# Altium footprint library Package_DFN_QFN.PcbLib: 735 footprints (part 38 of 46)
Each footprint in its own frame and in the unit in brackets; x right, y up, seen from the top. Pads: shape width x height; smd on the part's side, far side on the other; paste and mask are expansions set on the pad; w line width, h text height; cw(c..) or ccw(c..) is an arc to the next point about the centre after c.
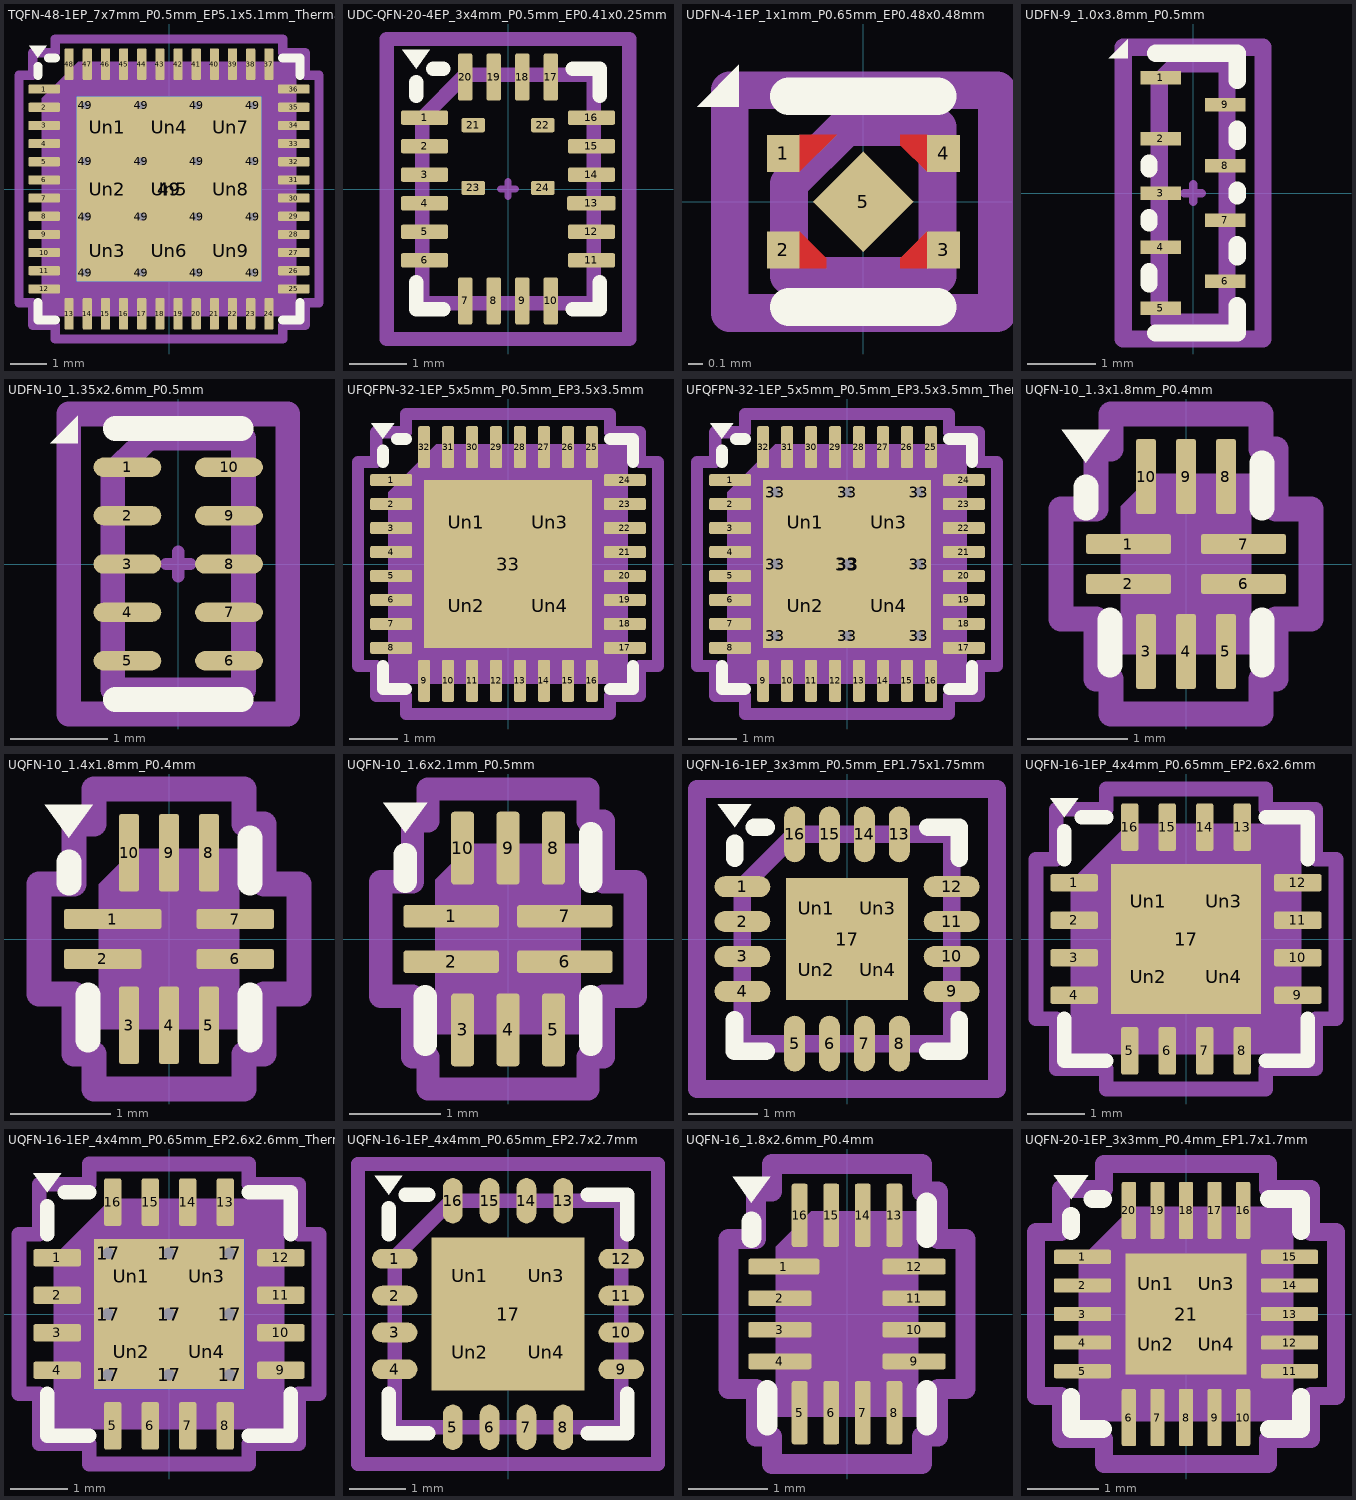
[diagram p37: the footprints below, top view; thin cyan lines are the x and y axes]

## TQFN-48-1EP_7x7mm_P0.5mm_EP5.1x5.1mm_ThermalVias [mm] "TQFN-48-1EP_7x7mm_P0.5mm_EP5.1x5.1mm_ThermalVias"
pads (75):
  rrect25% 0.875x0.25 smd: 1(-3.437,2.75) 2(-3.437,2.25) 3(-3.437,1.75) 4(-3.437,1.25) 5(-3.437,0.75) 6(-3.437,0.25) 7(-3.437,-0.25) 8(-3.437,-0.75) 9(-3.437,-1.25) 10(-3.437,-1.75) 11(-3.437,-2.25) 12(-3.437,-2.75) 25(3.437,-2.75) 26(3.437,-2.25) 27(3.437,-1.75) 28(3.437,-1.25) 29(3.437,-0.75) 30(3.437,-0.25) 31(3.437,0.25) 32(3.437,0.75) 33(3.437,1.25) 34(3.437,1.75) 35(3.437,2.25) 36(3.437,2.75)
  rrect25% 0.25x0.875 smd: 13(-2.75,-3.437) 14(-2.25,-3.437) 15(-1.75,-3.437) 16(-1.25,-3.437) 17(-0.75,-3.437) 18(-0.25,-3.437) 19(0.25,-3.437) 20(0.75,-3.437) 21(1.25,-3.437) 22(1.75,-3.437) 23(2.25,-3.437) 24(2.75,-3.437) 37(2.75,3.437) 38(2.25,3.437) 39(1.75,3.437) 40(1.25,3.437) 41(0.75,3.437) 42(0.25,3.437) 43(-0.25,3.437) 44(-0.75,3.437) 45(-1.25,3.437) 46(-1.75,3.437) 47(-2.25,3.437) 48(-2.75,3.437)
  round 0.5 hole 0.2: 49(-2.3,-2.3) 49(-2.3,-0.767) 49(-2.3,0.767) 49(-2.3,2.3) 49(-0.767,-2.3) 49(-0.767,-0.767) 49(-0.767,0.767) 49(-0.767,2.3) 49(0.767,-2.3) 49(0.767,-0.767) 49(0.767,0.767) 49(0.767,2.3) 49(2.3,-2.3) 49(2.3,-0.767) 49(2.3,0.767) 49(2.3,2.3)
  rect 5.1x5.1 smd: 49(0,0)
  rect 5.1x5.1 smd far side: 49(0,0)
  rrect17% 1.47x1.47 on Top Paste: Un1(-1.7,1.7) Un2(-1.7,0) Un3(-1.7,-1.7) Un4(0,1.7) Un5(0,0) Un6(0,-1.7) Un7(1.7,1.7) Un8(1.7,0) Un9(1.7,-1.7)
F.SilkS:
  region: -3.61,3.61 -3.85,3.94 -3.37,3.94
  lines w0.254: -3.61,-3.135 -3.61,-3.61 -3.135,-3.61 ; -3.61,3.135 -3.61,3.37 ; -3.31,3.61 -3.135,3.61 ; 3.135,-3.61 3.61,-3.61 3.61,-3.135 ; 3.135,3.61 3.61,3.61 3.61,3.135
Top Component Center:
  lines w0.127: -0.127,0 0.127,0 -0.127,0 ; 0,-0.127 0,0.127 0,-0.127
Top Assembly:
  region: 3.5,-3.5 -3.5,-3.5 -3.5,2.5 -2.5,3.5 3.5,3.5
Top Courtyard:
  lines w0.254: -4.13,-3.13 -3.75,-3.13 -3.75,-3.75 -3.13,-3.75 -3.13,-4.13 3.13,-4.13 3.13,-3.75 3.75,-3.75 3.75,-3.13 4.13,-3.13 4.13,3.13 3.75,3.13 3.75,3.75 3.13,3.75 3.13,4.13 -3.13,4.13 -3.13,3.75 -3.75,3.75 -3.75,3.13 -4.13,3.13 -4.13,-3.13
Top Designator:
  text ".Designator" at -3.43,-0.344 h1.52
3D body "TQFN-48-1EP_7x7mm_P0.5mm_EP5.1x5.1mm.step": height 0.75, standoff 0, extent -3.5,-3.5 3.5,3.5

## UDC-QFN-20-4EP_3x4mm_P0.5mm_EP0.41x0.25mm [mm] "UDC-QFN-20-4EP_3x4mm_P0.5mm_EP0.41x0.25mm"
pads (24):
  rrect25% 0.825x0.25 smd: 1(-1.462,1.25) 2(-1.462,0.75) 3(-1.462,0.25) 4(-1.462,-0.25) 5(-1.462,-0.75) 6(-1.462,-1.25) 11(1.462,-1.25) 12(1.462,-0.75) 14(1.462,0.25) 15(1.462,0.75) 16(1.462,1.25)
  rrect25% 0.25x0.825 smd: 7(-0.75,-1.963) 8(-0.25,-1.963) 9(0.25,-1.963) 10(0.75,-1.963) 17(0.75,1.963) 18(0.25,1.963) 19(-0.25,1.963) 20(-0.75,1.963)
  rrect25% 0.85x0.25 smd: 13(1.462,-0.25)
  rrect25% 0.41x0.25 smd: 21(-0.61,1.119) 22(0.61,1.119) 23(-0.61,0.019) 24(0.61,0.019)
F.SilkS:
  region: -1.61,2.11 -1.85,2.44 -1.37,2.44
  lines w0.254: -1.61,-1.635 -1.61,-2.11 -1.135,-2.11 ; -1.61,1.635 -1.61,1.87 ; -1.31,2.11 -1.135,2.11 ; 1.135,-2.11 1.61,-2.11 1.61,-1.635 ; 1.135,2.11 1.61,2.11 1.61,1.635
Top Component Center:
  lines w0.127: -0.127,0 0.127,0 -0.127,0 ; 0,-0.127 0,0.127 0,-0.127
Top Assembly:
  lines w0.254: -1.5,-2 -1.5,1.25 -0.75,2 1.5,2 1.5,-2 -1.5,-2
Top Courtyard:
  lines w0.254: -2.13,-2.63 -2.13,2.63 2.13,2.63 2.13,-2.63 -2.13,-2.63
Top Designator:
  text ".Designator" at -3.43,-0.344 h1.52

## UDFN-4-1EP_1x1mm_P0.65mm_EP0.48x0.48mm [mm] "UDFN-4-1EP_1x1mm_P0.65mm_EP0.48x0.48mm"
pads (5):
  rect 0.22x0.25 smd: 1(-0.54,0.325) 2(-0.54,-0.325) 3(0.54,-0.325) 4(0.54,0.325)
  rect 0.48x0.48 smd rot 45: 5(0,0)
F.Cu:
  region: -0.43,0.2 -0.43,0.45 -0.18,0.45
  region: -0.25,-0.38 -0.25,-0.45 -0.43,-0.45 -0.43,-0.2
  region: 0.43,-0.45 0.25,-0.45 0.25,-0.38 0.43,-0.2
  region: 0.43,0.2 0.25,0.38 0.25,0.45 0.43,0.45
F.SilkS:
  region: -0.84,0.64 -1.12,0.64 -0.84,0.92
  lines w0.254: -0.5,-0.71 0.5,-0.71 ; -0.5,0.71 0.5,0.71
F.Paste:
  region: -0.43,0.2 -0.43,0.45 -0.18,0.45
  region: -0.25,-0.38 -0.25,-0.45 -0.43,-0.45 -0.43,-0.2
  region: 0.43,-0.45 0.25,-0.45 0.25,-0.38 0.43,-0.2
  region: 0.43,0.2 0.25,0.38 0.25,0.45 0.43,0.45
F.Mask:
  region: -0.43,0.2 -0.43,0.45 -0.18,0.45
  region: -0.25,-0.38 -0.25,-0.45 -0.43,-0.45 -0.43,-0.2
  region: 0.43,-0.45 0.25,-0.45 0.25,-0.38 0.43,-0.2
  region: 0.43,0.2 0.25,0.38 0.25,0.45 0.43,0.45
Top Component Center:
  lines w0.127: -0.127,0 0.127,0 -0.127,0 ; 0,-0.127 0,0.127 0,-0.127
Top Assembly:
  lines w0.254: -0.5,-0.5 -0.5,0.12 -0.12,0.5 0.5,0.5 0.5,-0.5 -0.5,-0.5
Top Courtyard:
  lines w0.254: -0.9,-0.75 -0.9,0.75 0.9,0.75 0.9,-0.75 -0.9,-0.75
Top Designator:
  text ".Designator" at -1.69,-0.17 h0.75
3D body "UDFN-4-1EP_1x1mm_P0.65mm_EP0.48x0.48mm.step": height 0.57, standoff 0, extent -0.5,-0.49 0.5,0.49

## UDFN-9_1.0x3.8mm_P0.5mm [mm] "UDFN-9_1.0x3.8mm_P0.5mm"
pads (9):
  rect 0.6x0.2 smd: 1(-0.475,1.7) 2(-0.475,0.8) 3(-0.475,0) 4(-0.475,-0.8) 5(-0.475,-1.7) 6(0.475,-1.3) 7(0.475,-0.4) 8(0.475,0.4) 9(0.475,1.3)
F.SilkS:
  region: -0.96,1.99 -1.24,1.99 -0.96,2.27
  lines w0.254: -0.65,-1.34 -0.65,-1.16 ; -0.65,-0.44 -0.65,-0.36 ; -0.65,0.36 -0.65,0.44 ; -0.55,-2.06 0.65,-2.06 0.65,-1.66 ; -0.55,2.06 0.65,2.06 0.65,1.66 ; 0.65,-0.94 0.65,-0.76 ; 0.65,-0.04 0.65,0.04 ; 0.65,0.76 0.65,0.94
Top Component Center:
  lines w0.127: -0.127,0 0.127,0 -0.127,0 ; 0,-0.127 0,0.127 0,-0.127
Top Assembly:
  lines w0.254: -0.5,-1.9 0.5,-1.9 0.5,1.9 -0.25,1.9 -0.5,1.65 -0.5,-1.9
Top Courtyard:
  lines w0.254: -1.03,-2.15 1.03,-2.15 1.03,2.15 -1.03,2.15 -1.03,-2.15
Top Designator:
  text ".Designator" at -1.69,-0.17 h0.75
3D body "UDFN-9_1.0x3.8mm_P0.5mm.step": height 0.5, standoff -0.01, extent -0.51,-1.9 0.51,1.9

## UDFN-10_1.35x2.6mm_P0.5mm [mm] "UDFN-10_1.35x2.6mm_P0.5mm"
pads (10):
  rrect100% 0.7x0.2 smd: 1(-0.525,1) 2(-0.525,0.5) 3(-0.525,0) 4(-0.525,-0.5) 5(-0.525,-1) 6(0.525,-1) 7(0.525,-0.5) 8(0.525,0) 9(0.525,0.5) 10(0.525,1)
F.SilkS:
  region: -1.04,1.25 -1.32,1.25 -1.04,1.53
  lines w0.254: -0.65,-1.4 0.65,-1.4 ; -0.65,1.4 0.65,1.4
Top Component Center:
  lines w0.127: -0.127,0 0.127,0 -0.127,0 ; 0,-0.127 0,0.127 0,-0.127
Top Assembly:
  lines w0.254: -0.675,-1.3 -0.675,0.95 -0.3,1.3 0.675,1.3 0.675,-1.3 -0.675,-1.3
Top Courtyard:
  lines w0.254: -1.13,-1.55 -1.13,1.55 1.13,1.55 1.13,-1.55 -1.13,-1.55
Top Designator:
  text ".Designator" at -2.251,-0.226 h1
3D body "UDFN-10_1.35x2.6mm_P0.5mm.step": height 0.52, standoff 0, extent -0.675,-1.29 0.675,1.29

## UFQFPN-32-1EP_5x5mm_P0.5mm_EP3.5x3.5mm [mm] "UFQFPN-32-1EP_5x5mm_P0.5mm_EP3.5x3.5mm"
pads (37):
  rrect25% 0.875x0.25 smd: 1(-2.438,1.75) 2(-2.438,1.25) 3(-2.438,0.75) 4(-2.438,0.25) 5(-2.438,-0.25) 6(-2.438,-0.75) 7(-2.438,-1.25) 8(-2.438,-1.75) 17(2.438,-1.75) 18(2.438,-1.25) 19(2.438,-0.75) 20(2.438,-0.25) 21(2.438,0.25) 22(2.438,0.75) 23(2.438,1.25) 24(2.438,1.75)
  rrect25% 0.25x0.875 smd: 9(-1.75,-2.438) 10(-1.25,-2.438) 11(-0.75,-2.438) 12(-0.25,-2.438) 13(0.25,-2.438) 14(0.75,-2.438) 15(1.25,-2.438) 16(1.75,-2.438) 25(1.75,2.438) 26(1.25,2.438) 27(0.75,2.438) 28(0.25,2.438) 29(-0.25,2.438) 30(-0.75,2.438) 31(-1.25,2.438) 32(-1.75,2.438)
  rect 3.5x3.5 smd: 33(0,0)
  rrect18% 1.41x1.41 on Top Paste: Un1(-0.875,0.875) Un2(-0.875,-0.875) Un3(0.875,0.875) Un4(0.875,-0.875)
F.SilkS:
  region: -2.61,2.61 -2.85,2.94 -2.37,2.94
  lines w0.254: -2.61,-2.135 -2.61,-2.61 -2.135,-2.61 ; -2.61,2.135 -2.61,2.37 ; -2.31,2.61 -2.135,2.61 ; 2.135,-2.61 2.61,-2.61 2.61,-2.135 ; 2.135,2.61 2.61,2.61 2.61,2.135
Top Component Center:
  lines w0.127: -0.127,0 0.127,0 -0.127,0 ; 0,-0.127 0,0.127 0,-0.127
Top Assembly:
  region: 2.5,-2.5 -2.5,-2.5 -2.5,1.5 -1.5,2.5 2.5,2.5
Top Courtyard:
  lines w0.254: -3.13,-2.13 -3.13,2.13 -2.75,2.13 -2.75,2.75 -2.13,2.75 -2.13,3.13 2.13,3.13 2.13,2.75 2.75,2.75 2.75,2.13 3.13,2.13 3.13,-2.13 2.75,-2.13 2.75,-2.75 2.13,-2.75 2.13,-3.13 -2.13,-3.13 -2.13,-2.75 -2.75,-2.75 -2.75,-2.13 -3.13,-2.13
Top Designator:
  text ".Designator" at -3.43,-0.344 h1.52

## UFQFPN-32-1EP_5x5mm_P0.5mm_EP3.5x3.5mm_ThermalVias [mm] "UFQFPN-32-1EP_5x5mm_P0.5mm_EP3.5x3.5mm_ThermalVias"
pads (47):
  rrect25% 0.875x0.25 smd: 1(-2.438,1.75) 2(-2.438,1.25) 3(-2.438,0.75) 4(-2.438,0.25) 5(-2.438,-0.25) 6(-2.438,-0.75) 7(-2.438,-1.25) 8(-2.438,-1.75) 17(2.438,-1.75) 18(2.438,-1.25) 19(2.438,-0.75) 20(2.438,-0.25) 21(2.438,0.25) 22(2.438,0.75) 23(2.438,1.25) 24(2.438,1.75)
  rrect25% 0.25x0.875 smd: 9(-1.75,-2.438) 10(-1.25,-2.438) 11(-0.75,-2.438) 12(-0.25,-2.438) 13(0.25,-2.438) 14(0.75,-2.438) 15(1.25,-2.438) 16(1.75,-2.438) 25(1.75,2.438) 26(1.25,2.438) 27(0.75,2.438) 28(0.25,2.438) 29(-0.25,2.438) 30(-0.75,2.438) 31(-1.25,2.438) 32(-1.75,2.438)
  round 0.5 hole 0.2: 33(-1.5,-1.5) 33(-1.5,0) 33(-1.5,1.5) 33(0,-1.5) 33(0,0) 33(0,1.5) 33(1.5,-1.5) 33(1.5,0) 33(1.5,1.5)
  rect 3.5x3.5 smd: 33(0,0)
  rect 3.5x3.5 smd far side: 33(0,0)
  rrect18% 1.41x1.41 on Top Paste: Un1(-0.875,0.875) Un2(-0.875,-0.875) Un3(0.875,0.875) Un4(0.875,-0.875)
F.SilkS:
  region: -2.61,2.61 -2.85,2.94 -2.37,2.94
  lines w0.254: -2.61,-2.135 -2.61,-2.61 -2.135,-2.61 ; -2.61,2.135 -2.61,2.37 ; -2.31,2.61 -2.135,2.61 ; 2.135,-2.61 2.61,-2.61 2.61,-2.135 ; 2.135,2.61 2.61,2.61 2.61,2.135
Top Component Center:
  lines w0.127: -0.127,0 0.127,0 -0.127,0 ; 0,-0.127 0,0.127 0,-0.127
Top Assembly:
  region: 2.5,-2.5 -2.5,-2.5 -2.5,1.5 -1.5,2.5 2.5,2.5
Top Courtyard:
  lines w0.254: -3.13,-2.13 -2.75,-2.13 -2.75,-2.75 -2.13,-2.75 -2.13,-3.13 2.13,-3.13 2.13,-2.75 2.75,-2.75 2.75,-2.13 3.13,-2.13 3.13,2.13 2.75,2.13 2.75,2.75 2.13,2.75 2.13,3.13 -2.13,3.13 -2.13,2.75 -2.75,2.75 -2.75,2.13 -3.13,2.13 -3.13,-2.13
Top Designator:
  text ".Designator" at -3.43,-0.344 h1.52

## UQFN-10_1.3x1.8mm_P0.4mm [mm] "UQFN-10_1.3x1.8mm_P0.4mm"
pads (10):
  rrect25% 0.85x0.2 smd: 1(-0.575,0.2) 2(-0.575,-0.2) 6(0.575,-0.2) 7(0.575,0.2)
  rrect25% 0.2x0.75 smd: 3(-0.4,-0.875) 4(0,-0.875) 5(0.4,-0.875) 8(0.4,0.875) 9(0,0.875) 10(-0.4,0.875)
F.SilkS:
  region: -1,1.01 -1.24,1.34 -0.76,1.34
  lines w0.254: -1,0.56 -1,0.77 ; -0.76,-1.01 -0.76,-0.56 ; 0.76,-1.01 0.76,-0.56 ; 0.76,0.56 0.76,1.01
Top Component Center:
  lines w0.127: -0.127,0 0.127,0 -0.127,0 ; 0,-0.127 0,0.127 0,-0.127
Top Assembly:
  region: 0.65,-0.9 -0.65,-0.9 -0.65,0.575 -0.325,0.9 0.65,0.9
Top Courtyard:
  lines w0.254: -1.25,-0.55 -1.25,0.55 -0.9,0.55 -0.9,1.15 -0.75,1.15 -0.75,1.5 0.75,1.5 0.75,1.15 0.9,1.15 0.9,0.55 1.25,0.55 1.25,-0.55 0.9,-0.55 0.9,-1.15 0.75,-1.15 0.75,-1.5 -0.75,-1.5 -0.75,-1.15 -0.9,-1.15 -0.9,-0.55 -1.25,-0.55
Top Designator:
  text ".Designator" at -2.251,-0.226 h1

## UQFN-10_1.4x1.8mm_P0.4mm [mm] "UQFN-10_1.4x1.8mm_P0.4mm"
pads (10):
  rrect25% 0.975x0.2 smd: 1(-0.563,0.2)
  rrect25% 0.775x0.2 smd: 2(-0.663,-0.2) 6(0.663,-0.2) 7(0.663,0.2)
  rrect25% 0.2x0.775 smd: 3(-0.4,-0.863) 4(0,-0.863) 5(0.4,-0.863) 8(0.4,0.863) 9(0,0.863) 10(-0.4,0.863)
F.SilkS:
  region: -1,1.01 -1.24,1.34 -0.76,1.34
  lines w0.254: -1,0.56 -1,0.77 ; -0.81,-1.01 -0.81,-0.56 ; 0.81,-1.01 0.81,-0.56 ; 0.81,0.56 0.81,1.01
Top Component Center:
  lines w0.127: -0.127,0 0.127,0 -0.127,0 ; 0,-0.127 0,0.127 0,-0.127
Top Assembly:
  region: 0.7,-0.9 -0.7,-0.9 -0.7,0.55 -0.35,0.9 0.7,0.9
Top Courtyard:
  lines w0.254: -1.3,-0.55 -1.3,0.55 -0.95,0.55 -0.95,1.15 -0.75,1.15 -0.75,1.5 0.75,1.5 0.75,1.15 0.95,1.15 0.95,0.55 1.3,0.55 1.3,-0.55 0.95,-0.55 0.95,-1.15 0.75,-1.15 0.75,-1.5 -0.75,-1.5 -0.75,-1.15 -0.95,-1.15 -0.95,-0.55 -1.3,-0.55
Top Designator:
  text ".Designator" at -2.251,-0.226 h1
3D body "UQFN-10_1.4x1.8mm_P0.4mm.step": height 0.57, standoff 0, extent -0.7,-0.9 0.7,0.9

## UQFN-10_1.6x2.1mm_P0.5mm [mm] "UQFN-10_1.6x2.1mm_P0.5mm"
pads (10):
  rrect25% 1.05x0.25 smd: 1(-0.625,0.25) 2(-0.625,-0.25) 6(0.625,-0.25) 7(0.625,0.25)
  rrect25% 0.25x0.8 smd: 3(-0.5,-1) 4(0,-1) 5(0.5,-1) 8(0.5,1) 9(0,1) 10(-0.5,1)
F.SilkS:
  region: -1.13,1.17 -1.37,1.5 -0.89,1.5
  lines w0.254: -1.13,0.635 -1.13,0.93 ; -0.91,-1.16 -0.91,-0.635 ; 0.91,-1.16 0.91,-0.635 ; 0.91,0.635 0.91,1.16
Top Component Center:
  lines w0.127: -0.127,0 0.127,0 -0.127,0 ; 0,-0.127 0,0.127 0,-0.127
Top Assembly:
  region: 0.8,-1.05 -0.8,-1.05 -0.8,0.65 -0.4,1.05 0.8,1.05
Top Courtyard:
  lines w0.254: -1.4,-0.63 -1.4,0.63 -1.05,0.63 -1.05,1.3 -0.88,1.3 -0.88,1.65 0.88,1.65 0.88,1.3 1.05,1.3 1.05,0.63 1.4,0.63 1.4,-0.63 1.05,-0.63 1.05,-1.3 0.88,-1.3 0.88,-1.65 -0.88,-1.65 -0.88,-1.3 -1.05,-1.3 -1.05,-0.63 -1.4,-0.63
Top Designator:
  text ".Designator" at -2.251,-0.226 h1

## UQFN-16-1EP_3x3mm_P0.5mm_EP1.75x1.75mm [mm] "UQFN-16-1EP_3x3mm_P0.5mm_EP1.75x1.75mm"
pads (21):
  rrect100% 0.8x0.3 smd: 1(-1.5,0.75) 2(-1.5,0.25) 3(-1.5,-0.25) 4(-1.5,-0.75) 9(1.5,-0.75) 10(1.5,-0.25) 11(1.5,0.25) 12(1.5,0.75)
  rrect100% 0.3x0.8 smd: 5(-0.75,-1.5) 6(-0.25,-1.5) 7(0.25,-1.5) 8(0.75,-1.5) 13(0.75,1.5) 14(0.25,1.5) 15(-0.25,1.5) 16(-0.75,1.5)
  rect 1.75x1.75 smd: 17(0,0)
  rect 0.7x0.7 on Top Paste: Un1(-0.437,0.437) Un2(-0.437,-0.437) Un3(0.437,0.437) Un4(0.437,-0.437)
F.SilkS:
  region: -1.61,1.6 -1.85,1.93 -1.37,1.93
  lines w0.254: -1.611,-1.16 -1.611,-1.61 -1.16,-1.61 ; -1.61,1.158 -1.61,1.37 ; -1.33,1.6 -1.16,1.6 ; 1.16,-1.61 1.61,-1.61 1.61,-1.16 ; 1.16,1.603 1.61,1.603 1.61,1.16
Top Component Center:
  lines w0.127: -0.127,0 0.127,0 -0.127,0 ; 0,-0.127 0,0.127 0,-0.127
Top Assembly:
  lines w0.254: -1.5,-1.5 1.5,-1.5 1.5,1.5 -0.75,1.5 -1.5,0.75 -1.5,-1.5
Top Courtyard:
  lines w0.254: -2.15,-2.15 2.15,-2.15 2.15,2.15 -2.15,2.15 -2.15,-2.15
Top Designator:
  text ".Designator" at -3.43,-0.344 h1.52
3D body "UQFN-16-1EP_3x3mm_P0.5mm_EP1.75x1.75mm.step": height 0.52, standoff 0, extent -1.5,-1.5 1.5,1.5

## UQFN-16-1EP_4x4mm_P0.65mm_EP2.6x2.6mm [mm] "UQFN-16-1EP_4x4mm_P0.65mm_EP2.6x2.6mm"
pads (21):
  rrect25% 0.825x0.3 smd: 1(-1.937,0.975) 2(-1.937,0.325) 3(-1.937,-0.325) 4(-1.937,-0.975) 9(1.937,-0.975) 10(1.937,-0.325) 11(1.937,0.325) 12(1.937,0.975)
  rrect25% 0.3x0.825 smd: 5(-0.975,-1.937) 6(-0.325,-1.937) 7(0.325,-1.937) 8(0.975,-1.937) 13(0.975,1.937) 14(0.325,1.937) 15(-0.325,1.937) 16(-0.975,1.937)
  rect 2.6x2.6 smd: 17(0,0)
  rrect24% 1.05x1.05 on Top Paste: Un1(-0.65,0.65) Un2(-0.65,-0.65) Un3(0.65,0.65) Un4(0.65,-0.65)
F.SilkS:
  region: -2.11,2.11 -2.35,2.44 -1.87,2.44
  lines w0.254: -2.11,-1.385 -2.11,-2.11 -1.385,-2.11 ; -2.11,1.385 -2.11,1.87 ; -1.81,2.11 -1.385,2.11 ; 1.385,-2.11 2.11,-2.11 2.11,-1.385 ; 1.385,2.11 2.11,2.11 2.11,1.385
Top Component Center:
  lines w0.127: -0.127,0 0.127,0 -0.127,0 ; 0,-0.127 0,0.127 0,-0.127
Top Assembly:
  region: 2,-2 -2,-2 -2,1 -1,2 2,2
Top Courtyard:
  lines w0.254: -2.6,-1.38 -2.6,1.38 -2.25,1.38 -2.25,2.25 -1.38,2.25 -1.38,2.6 1.38,2.6 1.38,2.25 2.25,2.25 2.25,1.38 2.6,1.38 2.6,-1.38 2.25,-1.38 2.25,-2.25 1.38,-2.25 1.38,-2.6 -1.38,-2.6 -1.38,-2.25 -2.25,-2.25 -2.25,-1.38 -2.6,-1.38
Top Designator:
  text ".Designator" at -3.43,-0.344 h1.52
3D body "UQFN-16-1EP_4x4mm_P0.65mm_EP2.7x2.7mm.step": height 0.62, standoff 0, extent -2,-2 2,2

## UQFN-16-1EP_4x4mm_P0.65mm_EP2.6x2.6mm_ThermalVias [mm] "UQFN-16-1EP_4x4mm_P0.65mm_EP2.6x2.6mm_ThermalVias"
pads (31):
  rrect25% 0.825x0.3 smd: 1(-1.937,0.975) 2(-1.937,0.325) 3(-1.937,-0.325) 4(-1.937,-0.975) 9(1.937,-0.975) 10(1.937,-0.325) 11(1.937,0.325) 12(1.937,0.975)
  rrect25% 0.3x0.825 smd: 5(-0.975,-1.937) 6(-0.325,-1.937) 7(0.325,-1.937) 8(0.975,-1.937) 13(0.975,1.937) 14(0.325,1.937) 15(-0.325,1.937) 16(-0.975,1.937)
  round 0.5 hole 0.2: 17(-1.05,-1.05) 17(-1.05,0) 17(-1.05,1.05) 17(0,-1.05) 17(0,0) 17(0,1.05) 17(1.05,-1.05) 17(1.05,0) 17(1.05,1.05)
  rect 2.6x2.6 smd: 17(0,0)
  rect 2.6x2.6 smd far side: 17(0,0)
  rrect22% 1.13x1.13 on Top Paste: Un1(-0.65,0.65) Un2(-0.65,-0.65) Un3(0.65,0.65) Un4(0.65,-0.65)
F.SilkS:
  region: -2.11,2.11 -2.35,2.44 -1.87,2.44
  lines w0.254: -2.11,-1.385 -2.11,-2.11 -1.385,-2.11 ; -2.11,1.385 -2.11,1.87 ; -1.81,2.11 -1.385,2.11 ; 1.385,-2.11 2.11,-2.11 2.11,-1.385 ; 1.385,2.11 2.11,2.11 2.11,1.385
Top Component Center:
  lines w0.127: -0.127,0 0.127,0 -0.127,0 ; 0,-0.127 0,0.127 0,-0.127
Top Assembly:
  region: 2,-2 -2,-2 -2,1 -1,2 2,2
Top Courtyard:
  lines w0.254: -2.6,-1.38 -2.25,-1.38 -2.25,-2.25 -1.38,-2.25 -1.38,-2.6 1.38,-2.6 1.38,-2.25 2.25,-2.25 2.25,-1.38 2.6,-1.38 2.6,1.38 2.25,1.38 2.25,2.25 1.38,2.25 1.38,2.6 -1.38,2.6 -1.38,2.25 -2.25,2.25 -2.25,1.38 -2.6,1.38 -2.6,-1.38
Top Designator:
  text ".Designator" at -3.43,-0.344 h1.52
3D body "UQFN-16-1EP_4x4mm_P0.65mm_EP2.7x2.7mm.step": height 0.62, standoff 0, extent -2,-2 2,2

## UQFN-16-1EP_4x4mm_P0.65mm_EP2.7x2.7mm [mm] "UQFN-16-1EP_4x4mm_P0.65mm_EP2.7x2.7mm"
pads (21):
  rrect100% 0.8x0.35 smd: 1(-2,0.975) 2(-2,0.325) 3(-2,-0.325) 4(-2,-0.975) 9(2,-0.975) 10(2,-0.325) 11(2,0.325) 12(2,0.975)
  rrect100% 0.35x0.8 smd: 5(-0.975,-2) 6(-0.325,-2) 7(0.325,-2) 8(0.975,-2) 13(0.975,2) 14(0.325,2) 15(-0.325,2) 16(-0.975,2)
  rect 2.7x2.7 smd: 17(0,0)
  rect 1.09x1.09 on Top Paste: Un1(-0.675,0.675) Un2(-0.675,-0.675) Un3(0.675,0.675) Un4(0.675,-0.675)
F.SilkS:
  region: -2.11,2.11 -2.35,2.44 -1.87,2.44
  lines w0.254: -2.11,-1.41 -2.11,-2.11 -1.41,-2.11 ; -2.11,1.41 -2.11,1.87 ; -1.81,2.11 -1.41,2.11 ; 1.41,-2.11 2.11,-2.11 2.11,-1.41 ; 1.41,2.11 2.11,2.11 2.11,1.41
Top Component Center:
  lines w0.127: -0.127,0 0.127,0 -0.127,0 ; 0,-0.127 0,0.127 0,-0.127
Top Assembly:
  lines w0.254: -2,-2 2,-2 2,2 -1,2 -2,1 -2,-2
Top Courtyard:
  lines w0.254: -2.65,-2.65 2.65,-2.65 2.65,2.65 -2.65,2.65 -2.65,-2.65
Top Designator:
  text ".Designator" at -3.43,-0.344 h1.52
3D body "UQFN-16-1EP_4x4mm_P0.65mm_EP2.7x2.7mm.step": height 0.62, standoff 0, extent -2,-2 2,2

## UQFN-16_1.8x2.6mm_P0.4mm [mm] "UQFN-16_1.8x2.6mm_P0.4mm"
pads (16):
  rrect25% 0.9x0.2 smd: 1(-0.8,0.6)
  rrect25% 0.8x0.2 smd: 2(-0.85,0.2) 3(-0.85,-0.2) 4(-0.85,-0.6) 9(0.85,-0.6) 10(0.85,-0.2) 11(0.85,0.2) 12(0.85,0.6)
  rrect25% 0.2x0.8 smd: 5(-0.6,-1.25) 6(-0.2,-1.25) 7(0.2,-1.25) 8(0.6,-1.25) 13(0.6,1.25) 14(0.2,1.25) 15(-0.2,1.25) 16(-0.6,1.25)
F.SilkS:
  region: -1.21,1.41 -1.45,1.74 -0.97,1.74
  lines w0.254: -1.21,0.96 -1.21,1.17 ; -1.01,-1.41 -1.01,-0.96 ; 1.01,-1.41 1.01,-0.96 ; 1.01,0.96 1.01,1.41
Top Component Center:
  lines w0.127: -0.127,0 0.127,0 -0.127,0 ; 0,-0.127 0,0.127 0,-0.127
Top Assembly:
  region: 0.9,-1.3 -0.9,-1.3 -0.9,0.85 -0.45,1.3 0.9,1.3
Top Courtyard:
  lines w0.254: -1.5,-0.95 -1.15,-0.95 -1.15,-1.55 -0.95,-1.55 -0.95,-1.9 0.95,-1.9 0.95,-1.55 1.15,-1.55 1.15,-0.95 1.5,-0.95 1.5,0.95 1.15,0.95 1.15,1.55 0.95,1.55 0.95,1.9 -0.95,1.9 -0.95,1.55 -1.15,1.55 -1.15,0.95 -1.5,0.95 -1.5,-0.95
Top Designator:
  text ".Designator" at -2.251,-0.226 h1

## UQFN-20-1EP_3x3mm_P0.4mm_EP1.7x1.7mm [mm] "UQFN-20-1EP_3x3mm_P0.4mm_EP1.7x1.7mm"
pads (25):
  rrect25% 0.8x0.2 smd: 1(-1.45,0.8) 2(-1.45,0.4) 3(-1.45,0) 4(-1.45,-0.4) 5(-1.45,-0.8) 11(1.45,-0.8) 12(1.45,-0.4) 13(1.45,0) 14(1.45,0.4) 15(1.45,0.8)
  rrect25% 0.2x0.8 smd: 6(-0.8,-1.45) 7(-0.4,-1.45) 8(0,-1.45) 9(0.4,-1.45) 10(0.8,-1.45) 16(0.8,1.45) 17(0.4,1.45) 18(0,1.45) 19(-0.4,1.45) 20(-0.8,1.45)
  rect 1.7x1.7 smd: 21(0,0)
  rrect25% 0.69x0.69 on Top Paste: Un1(-0.425,0.425) Un2(-0.425,-0.425) Un3(0.425,0.425) Un4(0.425,-0.425)
F.SilkS:
  region: -1.61,1.61 -1.85,1.94 -1.37,1.94
  lines w0.254: -1.61,-1.16 -1.61,-1.61 -1.16,-1.61 ; -1.61,1.16 -1.61,1.37 ; -1.31,1.61 -1.16,1.61 ; 1.16,-1.61 1.61,-1.61 1.61,-1.16 ; 1.16,1.61 1.61,1.61 1.61,1.16
Top Component Center:
  lines w0.127: -0.127,0 0.127,0 -0.127,0 ; 0,-0.127 0,0.127 0,-0.127
Top Assembly:
  region: 1.5,-1.5 -1.5,-1.5 -1.5,0.75 -0.75,1.5 1.5,1.5
Top Courtyard:
  lines w0.254: -2.1,-1.15 -1.75,-1.15 -1.75,-1.75 -1.15,-1.75 -1.15,-2.1 1.15,-2.1 1.15,-1.75 1.75,-1.75 1.75,-1.15 2.1,-1.15 2.1,1.15 1.75,1.15 1.75,1.75 1.15,1.75 1.15,2.1 -1.15,2.1 -1.15,1.75 -1.75,1.75 -1.75,1.15 -2.1,1.15 -2.1,-1.15
Top Designator:
  text ".Designator" at -3.43,-0.344 h1.52
3D body "UQFN-20-1EP_3x3mm_P0.4mm_EP1.85x1.85mm.step": height 0.52, standoff 0, extent -1.5,-1.5 1.5,1.5